# Altium schematic symbol library THORLABS_S7060r.SchLib: 1 symbol
Pins are listed as number, name and electrical type; pins without a type are passive.

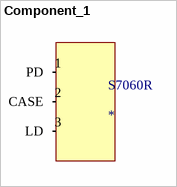
[diagram p0: symbol Component_1]

## Component_1
designator S7060R
footprint PCBComponent_1
pins: 1 PD, 2 CASE, 3 LD